# Altium footprint library Package_DFN_QFN.PcbLib: 735 footprints (part 7 of 46)
Each footprint in its own frame and in the unit in brackets; x right, y up, seen from the top. Pads: shape width x height; smd on the part's side, far side on the other; paste and mask are expansions set on the pad; w line width, h text height; cw(c..) or ccw(c..) is an arc to the next point about the centre after c.
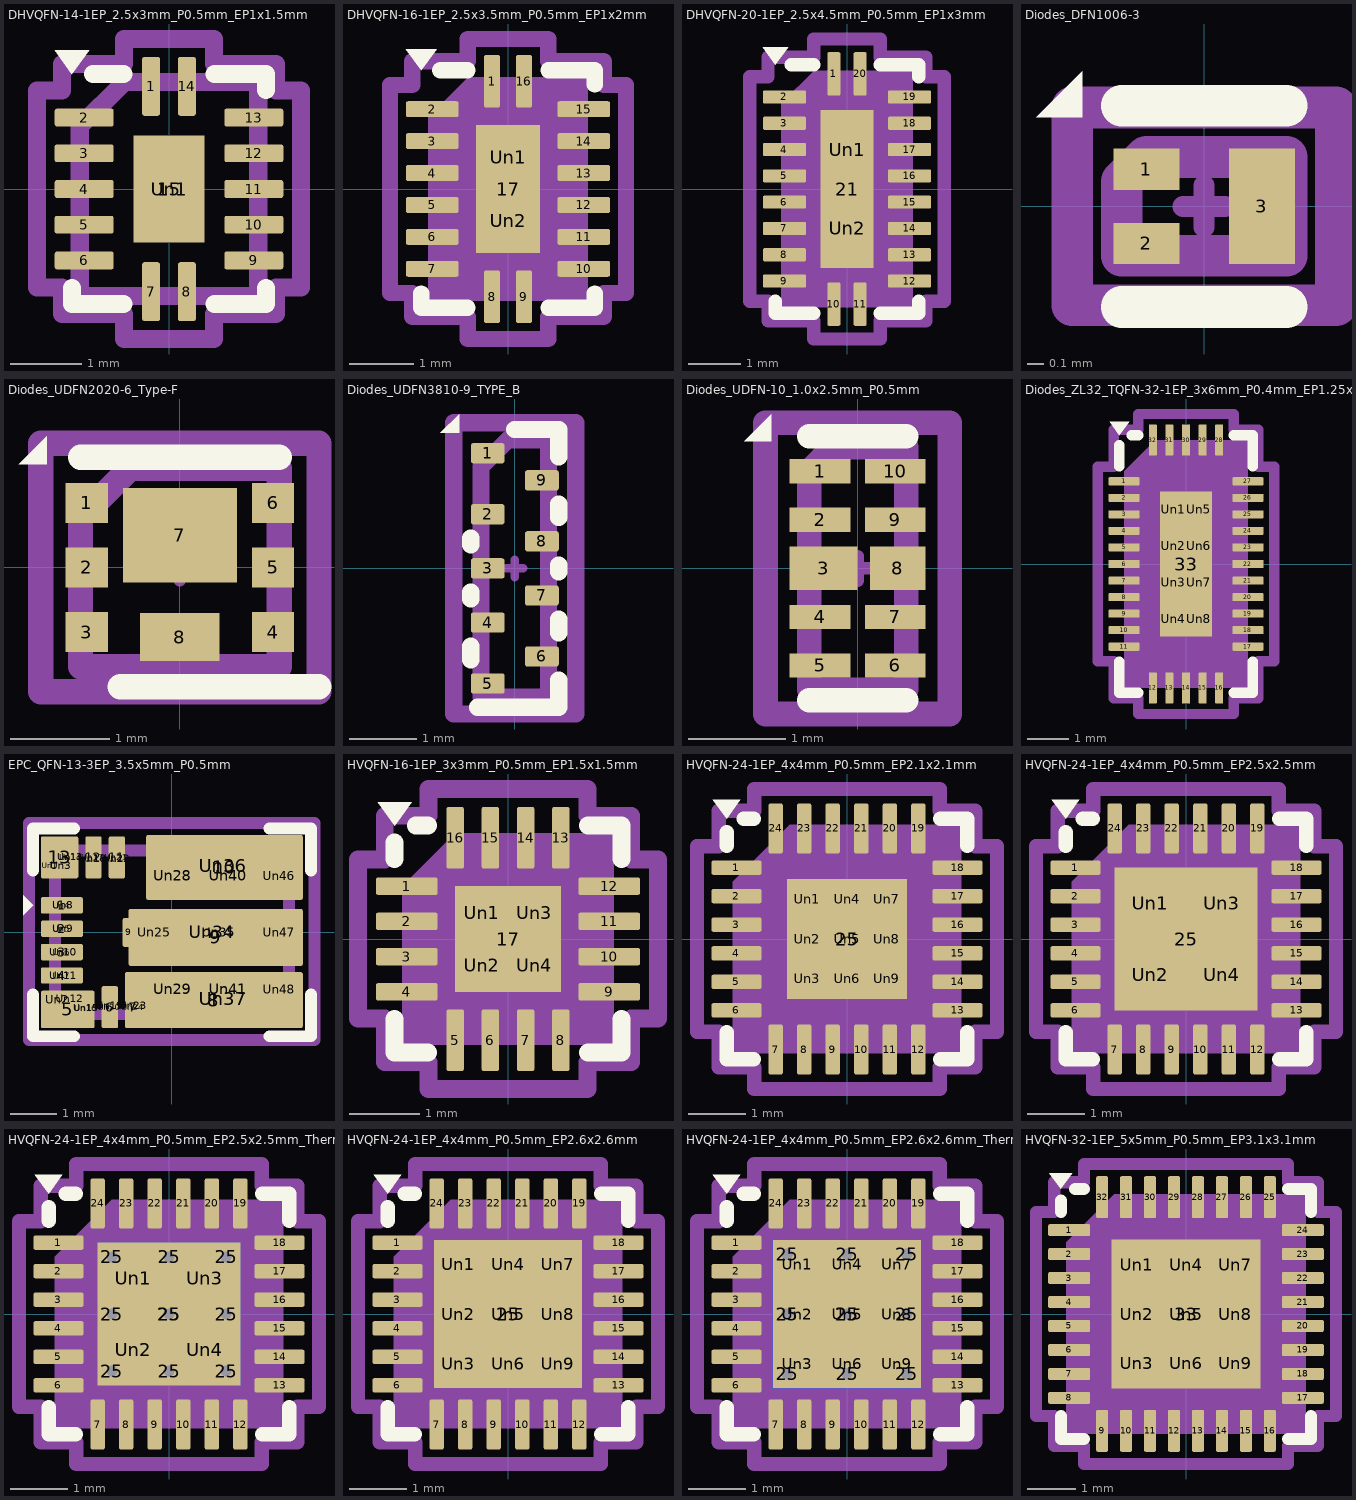
[diagram p6: the footprints below, top view; thin cyan lines are the x and y axes]

## DHVQFN-14-1EP_2.5x3mm_P0.5mm_EP1x1.5mm [mm] "DHVQFN-14-1EP_2.5x3mm_P0.5mm_EP1x1.5mm"
pads (16):
  rrect25% 0.25x0.825 smd: 1(-0.25,1.438) 7(-0.25,-1.438) 8(0.25,-1.438) 14(0.25,1.438)
  rrect25% 0.825x0.25 smd: 2(-1.188,1) 3(-1.188,0.5) 4(-1.188,0) 5(-1.188,-0.5) 6(-1.188,-1) 9(1.188,-1) 10(1.188,-0.5) 11(1.188,0) 12(1.188,0.5) 13(1.188,1)
  rect 1x1.5 smd: 15(0,0)
  rrect25% 0.81x1.21 on Top Paste: Un1(0,0)
F.SilkS:
  region: -1.36,1.61 -1.6,1.94 -1.12,1.94
  lines w0.254: -1.36,-1.385 -1.36,-1.61 -0.635,-1.61 ; -1.06,1.61 -0.635,1.61 ; 0.635,-1.61 1.36,-1.61 1.36,-1.385 ; 0.635,1.61 1.36,1.61 1.36,1.385
Top Component Center:
  lines w0.127: -0.127,0 0.127,0 -0.127,0 ; 0,-0.127 0,0.127 0,-0.127
Top Assembly:
  lines w0.254: -1.25,-1.5 1.25,-1.5 1.25,1.5 -0.625,1.5 -1.25,0.875 -1.25,-1.5
Top Courtyard:
  lines w0.254: -1.85,-1.38 -1.85,1.38 -1.5,1.38 -1.5,1.75 -0.63,1.75 -0.63,2.1 0.63,2.1 0.63,1.75 1.5,1.75 1.5,1.38 1.85,1.38 1.85,-1.38 1.5,-1.38 1.5,-1.75 0.63,-1.75 0.63,-2.1 -0.63,-2.1 -0.63,-1.75 -1.5,-1.75 -1.5,-1.38 -1.85,-1.38
Top Designator:
  text ".Designator" at -3.43,-0.344 h1.52
3D body "DHVQFN-14-1EP_2.5x3mm_P0.5mm_EP1x1.5mm.step": height 1, standoff 0, extent -1.25,-1.5 1.25,1.5

## DHVQFN-16-1EP_2.5x3.5mm_P0.5mm_EP1x2mm [mm] "DHVQFN-16-1EP_2.5x3.5mm_P0.5mm_EP1x2mm"
pads (19):
  rrect25% 0.25x0.825 smd: 1(-0.25,1.687) 8(-0.25,-1.687) 9(0.25,-1.687) 16(0.25,1.687)
  rrect25% 0.825x0.25 smd: 2(-1.188,1.25) 3(-1.188,0.75) 4(-1.188,0.25) 5(-1.188,-0.25) 6(-1.188,-0.75) 7(-1.188,-1.25) 10(1.188,-1.25) 11(1.188,-0.75) 12(1.188,-0.25) 13(1.188,0.25) 14(1.188,0.75) 15(1.188,1.25)
  rect 1x2 smd: 17(0,0)
  rrect25% 0.81x0.81 on Top Paste: Un1(0,0.5) Un2(0,-0.5)
F.SilkS:
  region: -1.36,1.86 -1.6,2.19 -1.12,2.19
  lines w0.254: -1.36,-1.635 -1.36,-1.86 -0.635,-1.86 ; -1.06,1.86 -0.635,1.86 ; 0.635,-1.86 1.36,-1.86 1.36,-1.635 ; 0.635,1.86 1.36,1.86 1.36,1.635
Top Component Center:
  lines w0.127: -0.127,0 0.127,0 -0.127,0 ; 0,-0.127 0,0.127 0,-0.127
Top Assembly:
  region: 1.25,-1.75 -1.25,-1.75 -1.25,1.125 -0.625,1.75 1.25,1.75
Top Courtyard:
  lines w0.254: -1.85,-1.63 -1.85,1.63 -1.5,1.63 -1.5,2 -0.63,2 -0.63,2.35 0.63,2.35 0.63,2 1.5,2 1.5,1.63 1.85,1.63 1.85,-1.63 1.5,-1.63 1.5,-2 0.63,-2 0.63,-2.35 -0.63,-2.35 -0.63,-2 -1.5,-2 -1.5,-1.63 -1.85,-1.63
Top Designator:
  text ".Designator" at -3.43,-0.344 h1.52

## DHVQFN-20-1EP_2.5x4.5mm_P0.5mm_EP1x3mm [mm] "DHVQFN-20-1EP_2.5x4.5mm_P0.5mm_EP1x3mm"
pads (23):
  rrect25% 0.25x0.825 smd: 1(-0.25,2.187) 10(-0.25,-2.187) 11(0.25,-2.187) 20(0.25,2.187)
  rrect25% 0.825x0.25 smd: 2(-1.188,1.75) 3(-1.188,1.25) 4(-1.188,0.75) 5(-1.188,0.25) 6(-1.188,-0.25) 7(-1.188,-0.75) 8(-1.188,-1.25) 9(-1.188,-1.75) 12(1.188,-1.75) 13(1.188,-1.25) 14(1.188,-0.75) 15(1.188,-0.25) 16(1.188,0.25) 17(1.188,0.75) 18(1.188,1.25) 19(1.188,1.75)
  rect 1x3 smd: 21(0,0)
  rrect25% 0.81x1.21 on Top Paste: Un1(0,0.75) Un2(0,-0.75)
F.SilkS:
  region: -1.36,2.36 -1.6,2.69 -1.12,2.69
  lines w0.254: -1.36,-2.135 -1.36,-2.36 -0.635,-2.36 ; -1.06,2.36 -0.635,2.36 ; 0.635,-2.36 1.36,-2.36 1.36,-2.135 ; 0.635,2.36 1.36,2.36 1.36,2.135
Top Component Center:
  lines w0.127: -0.127,0 0.127,0 -0.127,0 ; 0,-0.127 0,0.127 0,-0.127
Top Assembly:
  region: 1.25,-2.25 -1.25,-2.25 -1.25,1.625 -0.625,2.25 1.25,2.25
Top Courtyard:
  lines w0.254: -1.85,-2.13 -1.5,-2.13 -1.5,-2.5 -0.63,-2.5 -0.63,-2.85 0.63,-2.85 0.63,-2.5 1.5,-2.5 1.5,-2.13 1.85,-2.13 1.85,2.13 1.5,2.13 1.5,2.5 0.63,2.5 0.63,2.85 -0.63,2.85 -0.63,2.5 -1.5,2.5 -1.5,2.13 -1.85,2.13 -1.85,-2.13
Top Designator:
  text ".Designator" at -3.43,-0.344 h1.52

## Diodes_DFN1006-3 [mm] "Diodes_DFN1006-3"
pads (3):
  rect 0.4x0.25 smd: 1(-0.35,0.225) 2(-0.35,-0.225)
  rect 0.4x0.7 smd: 3(0.35,0)
F.SilkS:
  region: -0.74,0.54 -1.02,0.54 -0.74,0.82
  lines w0.254: -0.5,-0.61 0.5,-0.61 ; -0.5,0.61 0.5,0.61
Top Component Center:
  lines w0.127: -0.127,0 0.127,0 -0.127,0 ; 0,-0.127 0,0.127 0,-0.127
Top Assembly:
  lines w0.254: -0.5,-0.3 -0.5,0.15 -0.35,0.3 0.5,0.3 0.5,-0.3 -0.5,-0.3
Top Courtyard:
  lines w0.254: -0.8,-0.6 -0.8,0.6 0.8,0.6 0.8,-0.6 -0.8,-0.6
Top Designator:
  text ".Designator" at -1.69,-0.17 h0.75

## Diodes_UDFN2020-6_Type-F [mm] "Diodes_UDFN2020-6_Type-F"
pads (8):
  rect 0.425x0.4 smd: 1(-0.937,0.65) 2(-0.937,0) 3(-0.937,-0.65) 4(0.937,-0.65) 5(0.937,0) 6(0.937,0.65)
  rect 1.15x0.95 smd: 7(0,0.325)
  rect 0.8x0.48 smd: 8(0,-0.7)
F.SilkS:
  region: -1.34,1.04 -1.62,1.04 -1.34,1.32
  lines w0.254: -1,1.11 1,1.11 ; -0.6,-1.2 1.4,-1.2
Top Component Center:
  lines w0.127: -0.127,0 0.127,0 -0.127,0 ; 0,-0.127 0,0.127 0,-0.127
Top Assembly:
  lines w0.254: -1,-1 -1,0.5 -0.5,1 1,1 1,-1 -1,-1
Top Courtyard:
  lines w0.254: -1.4,-1.25 -1.4,1.25 1.4,1.25 1.4,-1.25 -1.4,-1.25
Top Designator:
  text ".Designator" at -2.251,-0.226 h1

## Diodes_UDFN3810-9_TYPE_B [mm] "Diodes_UDFN3810-9_TYPE_B"
pads (9):
  rrect25% 0.5x0.3 smd: 1(-0.4,1.7) 2(-0.4,0.8) 3(-0.4,0) 4(-0.4,-0.8) 5(-0.4,-1.7) 6(0.4,-1.3) 7(0.4,-0.4) 8(0.4,0.4) 9(0.4,1.3)
F.SilkS:
  region: -0.82,2 -1.1,2 -0.82,2.28
  lines w0.254: -0.65,-1.35 -0.65,-1.15 ; -0.65,-0.45 -0.65,-0.35 ; -0.65,0.35 -0.65,0.45 ; -0.55,-2.05 0.65,-2.05 0.65,-1.65 ; 0,2.05 0.65,2.05 0.65,1.65 ; 0.65,-0.95 0.65,-0.75 ; 0.65,-0.05 0.65,0.05 ; 0.65,0.75 0.65,0.95
Top Component Center:
  lines w0.127: -0.127,0 0.127,0 -0.127,0 ; 0,-0.127 0,0.127 0,-0.127
Top Assembly:
  lines w0.254: -0.5,-1.9 0.5,-1.9 0.5,1.9 -0.1,1.9 -0.5,1.5 -0.5,-1.9
Top Courtyard:
  lines w0.254: -0.9,-2.15 0.9,-2.15 0.9,2.15 -0.9,2.15 -0.9,-2.15
Top Designator:
  text ".Designator" at -2.251,-0.226 h1
3D body "Diodes_UDFN3810-9_TYPE_B.step": height 0.5, standoff -0.01, extent -0.51,-1.9 0.51,1.9

## Diodes_UDFN-10_1.0x2.5mm_P0.5mm [mm] "Diodes_UDFN-10_1.0x2.5mm_P0.5mm"
pads (10):
  rect 0.625x0.25 smd: 1(-0.387,1) 2(-0.387,0.5) 4(-0.387,-0.5) 5(-0.387,-1) 6(0.387,-1) 7(0.387,-0.5) 9(0.387,0.5) 10(0.387,1)
  rect 0.7x0.45 smd: 3(-0.35,0)
  rect 0.575x0.45 smd: 8(0.413,0)
F.SilkS:
  region: -0.89,1.31 -1.17,1.31 -0.89,1.59
  lines w0.254: -0.5,-1.36 0.5,-1.36 ; -0.5,1.36 0.5,1.36
Top Component Center:
  lines w0.127: -0.127,0 0.127,0 -0.127,0 ; 0,-0.127 0,0.127 0,-0.127
Top Assembly:
  lines w0.254: -0.5,-1.25 0.5,-1.25 0.5,1.25 -0.25,1.25 -0.5,1 -0.5,-1.25
Top Courtyard:
  lines w0.254: -0.95,-1.5 0.95,-1.5 0.95,1.5 -0.95,1.5 -0.95,-1.5
Top Designator:
  text ".Designator" at -1.121,-0.113 h0.5
3D body "Diodes_UDFN-10_1.0x2.5mm_P0.5mm.step": height 0.6, standoff 0, extent -0.506,-1.246 0.506,1.246

## Diodes_ZL32_TQFN-32-1EP_3x6mm_P0.4mm_EP1.25x3.5mm [mm] "Diodes_ZL32_TQFN-32-1EP_3x6mm_P0.4mm_EP1.25x3.5mm"
pads (41):
  rrect25% 0.75x0.2 smd: 1(-1.5,2) 2(-1.5,1.6) 3(-1.5,1.2) 4(-1.5,0.8) 5(-1.5,0.4) 6(-1.5,0) 7(-1.5,-0.4) 8(-1.5,-0.8) 9(-1.5,-1.2) 10(-1.5,-1.6) 11(-1.5,-2) 17(1.5,-2) 18(1.5,-1.6) 19(1.5,-1.2) 20(1.5,-0.8) 21(1.5,-0.4) 22(1.5,0) 23(1.5,0.4) 24(1.5,0.8) 25(1.5,1.2) 26(1.5,1.6) 27(1.5,2)
  rrect25% 0.2x0.75 smd: 12(-0.8,-3) 13(-0.4,-3) 14(0,-3) 15(0.4,-3) 16(0.8,-3) 28(0.8,3) 29(0.4,3) 30(0,3) 31(-0.4,3) 32(-0.8,3)
  rect 1.25x3.5 smd: 33(0,0)
  rrect25% 0.5x0.71 on Top Paste: Un1(-0.31,1.32) Un2(-0.31,0.44) Un3(-0.31,-0.44) Un4(-0.31,-1.32) Un5(0.31,1.32) Un6(0.31,0.44) Un7(0.31,-0.44) Un8(0.31,-1.32)
F.SilkS:
  region: -1.61,3.11 -1.85,3.44 -1.37,3.44
  lines w0.254: -1.61,-2.36 -1.61,-3.11 -1.16,-3.11 ; -1.61,2.36 -1.61,2.87 ; -1.31,3.11 -1.16,3.11 ; 1.16,-3.11 1.61,-3.11 1.61,-2.36 ; 1.16,3.11 1.61,3.11 1.61,2.36
Top Component Center:
  lines w0.127: -0.127,0 0.127,0 -0.127,0 ; 0,-0.127 0,0.127 0,-0.127
Top Assembly:
  region: 1.5,-3 -1.5,-3 -1.5,2.25 -0.75,3 1.5,3
Top Courtyard:
  lines w0.254: -2.13,-2.35 -1.75,-2.35 -1.75,-3.25 -1.15,-3.25 -1.15,-3.63 1.15,-3.63 1.15,-3.25 1.75,-3.25 1.75,-2.35 2.13,-2.35 2.13,2.35 1.75,2.35 1.75,3.25 1.15,3.25 1.15,3.63 -1.15,3.63 -1.15,3.25 -1.75,3.25 -1.75,2.35 -2.13,2.35 -2.13,-2.35
Top Designator:
  text ".Designator" at -3.43,-0.344 h1.52

## EPC_QFN-13-3EP_3.5x5mm_P0.5mm [mm] "EPC_QFN-13-3EP_3.5x5mm_P0.5mm"
pads (62):
  rrect23% 0.9x0.35 smd: 1(-2.351,0.578) 2(-2.351,0.078) 3(-2.351,-0.422) 4(-2.351,-0.922)
  rrect10% 1.15x0.8 smd: 5(-2.225,-1.647)
  rrect23% 0.35x0.9 smd: 6(-1.325,-1.598) 7(-0.825,-1.598) 11(-1.175,1.603) 12(-1.675,1.603)
  rrect7% 3.8x1.2 smd: 8(0.898,-1.447)
  rrect32% 0.25x0.623 smd: 9(-0.925,0)
  rrect7% 3.725x1.22 smd: 9(0.937,-0.107)
  rrect6% 3.35x1.39 smd: 10(1.125,1.39)
  rrect10% 0.8x0.9 smd: 13(-2.4,1.603)
  rrect16% 0.305x0.4 on Top Paste: Un1(-2.598,1.428)
  rrect15% 0.625x0.325 on Top Paste: Un2(-2.438,-1.435)
  rrect10% 0.675x0.3 on Top Solder: Un3(-2.362,1.428)
  rrect21% 0.8x0.24 on Top Paste: Un4(-2.351,0.575) Un5(-2.351,0.078) Un6(-2.351,-0.422) Un7(-2.351,-0.922)
  rrect10% 0.75x0.3 on Top Solder: Un8(-2.325,0.578) Un9(-2.325,0.078) Un10(-2.325,-0.422) Un11(-2.325,-0.922)
  rrect10% 1.025x0.3 on Top Solder: Un12(-2.187,-1.422)
  rrect10% 0.3x0.675 on Top Solder: Un13(-2.175,1.615) Un15(-1.825,-1.61)
  rrect21% 0.24x0.8 on Top Paste: Un14(-2.145,1.603) Un17(-1.675,1.603) Un20(-1.325,-1.598) Un21(-1.175,1.603) Un24(-0.825,-1.598)
  rrect21% 0.24x0.7 on Top Paste: Un16(-1.825,-1.622)
  rrect10% 0.3x0.75 on Top Solder: Un18(-1.675,1.578) Un19(-1.325,-1.572) Un22(-1.175,1.578) Un23(-0.825,-1.572)
  rrect14% 1x0.355 on Top Paste: Un25(-0.375,0) Un35(1.005,0)
  rrect16% 0.32x0.33 on Top Paste: Un26(-0.375,-1.81) Un27(-0.325,1.81) Un30(0.125,-1.81) Un31(0.175,1.81) Un32(0.625,-1.81) Un33(0.675,1.81) Un38(1.125,-1.81) Un39(1.175,1.81) Un42(1.625,-1.81) Un43(1.675,1.81) Un44(2.125,-1.81) Un45(2.175,1.81)
  rrect10% 1x0.495 on Top Paste: Un28(0.021,1.215) Un29(0.021,-1.215) Un40(1.201,1.215) Un41(1.201,-1.215)
  rrect22% 3.675x0.48 on Top Solder: Un34(0.863,0)
  rrect10% 3.2x1.05 on Top Solder: Un36(1.1,1.428) Un37(1.1,-1.422)
  rrect10% 0.819x0.495 on Top Paste: Un46(2.29,1.215) Un48(2.29,-1.215)
  rrect14% 0.815x0.355 on Top Paste: Un47(2.29,0)
F.SilkS:
  region: -2.96,0.578 -3.172,0.366 -3.172,0.79
  lines w0.254: -2.97,-1.325 -2.97,-2.22 -2.085,-2.22 ; -2.97,1.325 -2.97,2.22 -2.085,2.22 ; 2.087,-2.22 2.973,-2.22 ; 2.087,2.22 2.973,2.22 ; 2.97,-2.22 2.97,-1.325 ; 2.97,1.325 2.97,2.22
Top Component Center:
  lines w0.127: -0.127,0 0.127,0 -0.127,0 ; 0,-0.127 0,0.127 0,-0.127
Top Assembly:
  lines w0.254: -2.5,-1.75 -2.5,1.75 2.5,1.75 2.5,-1.75 -2.5,-1.75
Top Courtyard:
  lines w0.254: -3.05,-2.3 -3.05,2.34 3.05,2.34 3.05,-2.3 -3.05,-2.3
Top Designator:
  text ".Designator" at -3.43,-0.344 h1.52

## HVQFN-16-1EP_3x3mm_P0.5mm_EP1.5x1.5mm [mm] "HVQFN-16-1EP_3x3mm_P0.5mm_EP1.5x1.5mm"
pads (21):
  rrect25% 0.875x0.25 smd: 1(-1.438,0.75) 2(-1.438,0.25) 3(-1.438,-0.25) 4(-1.438,-0.75) 9(1.438,-0.75) 10(1.438,-0.25) 11(1.438,0.25) 12(1.438,0.75)
  rrect25% 0.25x0.875 smd: 5(-0.75,-1.438) 6(-0.25,-1.438) 7(0.25,-1.438) 8(0.75,-1.438) 13(0.75,1.438) 14(0.25,1.438) 15(-0.25,1.438) 16(-0.75,1.438)
  rect 1.5x1.5 smd: 17(0,0)
  rrect25% 0.6x0.6 on Top Paste: Un1(-0.375,0.375) Un2(-0.375,-0.375) Un3(0.375,0.375) Un4(0.375,-0.375)
F.SilkS:
  region: -1.61,1.61 -1.85,1.94 -1.37,1.94
  lines w0.254: -1.61,-1.135 -1.61,-1.61 -1.135,-1.61 ; -1.61,1.135 -1.61,1.37 ; -1.31,1.61 -1.135,1.61 ; 1.135,-1.61 1.61,-1.61 1.61,-1.135 ; 1.135,1.61 1.61,1.61 1.61,1.135
Top Component Center:
  lines w0.127: -0.127,0 0.127,0 -0.127,0 ; 0,-0.127 0,0.127 0,-0.127
Top Assembly:
  region: 1.5,-1.5 -1.5,-1.5 -1.5,0.75 -0.75,1.5 1.5,1.5
Top Courtyard:
  lines w0.254: -2.13,-1.13 -2.13,1.13 -1.75,1.13 -1.75,1.75 -1.13,1.75 -1.13,2.13 1.13,2.13 1.13,1.75 1.75,1.75 1.75,1.13 2.13,1.13 2.13,-1.13 1.75,-1.13 1.75,-1.75 1.13,-1.75 1.13,-2.13 -1.13,-2.13 -1.13,-1.75 -1.75,-1.75 -1.75,-1.13 -2.13,-1.13
Top Designator:
  text ".Designator" at -3.43,-0.344 h1.52

## HVQFN-24-1EP_4x4mm_P0.5mm_EP2.1x2.1mm [mm] "HVQFN-24-1EP_4x4mm_P0.5mm_EP2.1x2.1mm"
pads (34):
  rrect25% 0.875x0.25 smd: 1(-1.937,1.25) 2(-1.937,0.75) 3(-1.937,0.25) 4(-1.937,-0.25) 5(-1.937,-0.75) 6(-1.937,-1.25) 13(1.937,-1.25) 14(1.937,-0.75) 15(1.937,-0.25) 16(1.937,0.25) 17(1.937,0.75) 18(1.937,1.25)
  rrect25% 0.25x0.875 smd: 7(-1.25,-1.937) 8(-0.75,-1.937) 9(-0.25,-1.937) 10(0.25,-1.937) 11(0.75,-1.937) 12(1.25,-1.937) 19(1.25,1.937) 20(0.75,1.937) 21(0.25,1.937) 22(-0.25,1.937) 23(-0.75,1.937) 24(-1.25,1.937)
  rect 2.1x2.1 smd: 25(0,0)
  rrect25% 0.56x0.56 on Top Paste: Un1(-0.7,0.7) Un2(-0.7,0) Un3(-0.7,-0.7) Un4(0,0.7) Un5(0,0) Un6(0,-0.7) Un7(0.7,0.7) Un8(0.7,0) Un9(0.7,-0.7)
F.SilkS:
  region: -2.11,2.11 -2.35,2.44 -1.87,2.44
  lines w0.254: -2.11,-1.635 -2.11,-2.11 -1.635,-2.11 ; -2.11,1.635 -2.11,1.87 ; -1.81,2.11 -1.635,2.11 ; 1.635,-2.11 2.11,-2.11 2.11,-1.635 ; 1.635,2.11 2.11,2.11 2.11,1.635
Top Component Center:
  lines w0.127: -0.127,0 0.127,0 -0.127,0 ; 0,-0.127 0,0.127 0,-0.127
Top Assembly:
  region: 2,-2 -2,-2 -2,1 -1,2 2,2
Top Courtyard:
  lines w0.254: -2.63,-1.63 -2.25,-1.63 -2.25,-2.25 -1.63,-2.25 -1.63,-2.63 1.63,-2.63 1.63,-2.25 2.25,-2.25 2.25,-1.63 2.63,-1.63 2.63,1.63 2.25,1.63 2.25,2.25 1.63,2.25 1.63,2.63 -1.63,2.63 -1.63,2.25 -2.25,2.25 -2.25,1.63 -2.63,1.63 -2.63,-1.63
Top Designator:
  text ".Designator" at -3.43,-0.344 h1.52
3D body "HVQFN-24-1EP_4x4mm_P0.5mm_EP2.1x2.1mm.step": height 1.02, standoff 0, extent -2,-2 2,2

## HVQFN-24-1EP_4x4mm_P0.5mm_EP2.5x2.5mm [mm] "HVQFN-24-1EP_4x4mm_P0.5mm_EP2.5x2.5mm"
pads (29):
  rrect25% 0.875x0.25 smd: 1(-1.937,1.25) 2(-1.937,0.75) 3(-1.937,0.25) 4(-1.937,-0.25) 5(-1.937,-0.75) 6(-1.937,-1.25) 13(1.937,-1.25) 14(1.937,-0.75) 15(1.937,-0.25) 16(1.937,0.25) 17(1.937,0.75) 18(1.937,1.25)
  rrect25% 0.25x0.875 smd: 7(-1.25,-1.937) 8(-0.75,-1.937) 9(-0.25,-1.937) 10(0.25,-1.937) 11(0.75,-1.937) 12(1.25,-1.937) 19(1.25,1.937) 20(0.75,1.937) 21(0.25,1.937) 22(-0.25,1.937) 23(-0.75,1.937) 24(-1.25,1.937)
  rect 2.5x2.5 smd: 25(0,0)
  rrect25% 1.01x1.01 on Top Paste: Un1(-0.625,0.625) Un2(-0.625,-0.625) Un3(0.625,0.625) Un4(0.625,-0.625)
F.SilkS:
  region: -2.11,2.11 -2.35,2.44 -1.87,2.44
  lines w0.254: -2.11,-1.635 -2.11,-2.11 -1.635,-2.11 ; -2.11,1.635 -2.11,1.87 ; -1.81,2.11 -1.635,2.11 ; 1.635,-2.11 2.11,-2.11 2.11,-1.635 ; 1.635,2.11 2.11,2.11 2.11,1.635
Top Component Center:
  lines w0.127: -0.127,0 0.127,0 -0.127,0 ; 0,-0.127 0,0.127 0,-0.127
Top Assembly:
  region: 2,-2 -2,-2 -2,1 -1,2 2,2
Top Courtyard:
  lines w0.254: -2.63,-1.63 -2.63,1.63 -2.25,1.63 -2.25,2.25 -1.63,2.25 -1.63,2.63 1.63,2.63 1.63,2.25 2.25,2.25 2.25,1.63 2.63,1.63 2.63,-1.63 2.25,-1.63 2.25,-2.25 1.63,-2.25 1.63,-2.63 -1.63,-2.63 -1.63,-2.25 -2.25,-2.25 -2.25,-1.63 -2.63,-1.63
Top Designator:
  text ".Designator" at -3.43,-0.344 h1.52
3D body "HVQFN-24-1EP_4x4mm_P0.5mm_EP2.1x2.1mm.step": height 1.02, standoff 0, extent -2,-2 2,2

## HVQFN-24-1EP_4x4mm_P0.5mm_EP2.5x2.5mm_ThermalVias [mm] "HVQFN-24-1EP_4x4mm_P0.5mm_EP2.5x2.5mm_ThermalVias"
pads (39):
  rrect25% 0.875x0.25 smd: 1(-1.937,1.25) 2(-1.937,0.75) 3(-1.937,0.25) 4(-1.937,-0.25) 5(-1.937,-0.75) 6(-1.937,-1.25) 13(1.937,-1.25) 14(1.937,-0.75) 15(1.937,-0.25) 16(1.937,0.25) 17(1.937,0.75) 18(1.937,1.25)
  rrect25% 0.25x0.875 smd: 7(-1.25,-1.937) 8(-0.75,-1.937) 9(-0.25,-1.937) 10(0.25,-1.937) 11(0.75,-1.937) 12(1.25,-1.937) 19(1.25,1.937) 20(0.75,1.937) 21(0.25,1.937) 22(-0.25,1.937) 23(-0.75,1.937) 24(-1.25,1.937)
  round 0.5 hole 0.2: 25(-1,-1) 25(-1,0) 25(-1,1) 25(0,-1) 25(0,0) 25(0,1) 25(1,-1) 25(1,0) 25(1,1)
  rect 2.5x2.5 smd: 25(0,0)
  rect 2.5x2.5 smd far side: 25(0,0)
  rrect25% 0.93x0.93 on Top Paste: Un1(-0.625,0.625) Un2(-0.625,-0.625) Un3(0.625,0.625) Un4(0.625,-0.625)
F.SilkS:
  region: -2.11,2.11 -2.35,2.44 -1.87,2.44
  lines w0.254: -2.11,-1.635 -2.11,-2.11 -1.635,-2.11 ; -2.11,1.635 -2.11,1.87 ; -1.81,2.11 -1.635,2.11 ; 1.635,-2.11 2.11,-2.11 2.11,-1.635 ; 1.635,2.11 2.11,2.11 2.11,1.635
Top Component Center:
  lines w0.127: -0.127,0 0.127,0 -0.127,0 ; 0,-0.127 0,0.127 0,-0.127
Top Assembly:
  region: 2,-2 -2,-2 -2,1 -1,2 2,2
Top Courtyard:
  lines w0.254: -2.63,-1.63 -2.63,1.63 -2.25,1.63 -2.25,2.25 -1.63,2.25 -1.63,2.63 1.63,2.63 1.63,2.25 2.25,2.25 2.25,1.63 2.63,1.63 2.63,-1.63 2.25,-1.63 2.25,-2.25 1.63,-2.25 1.63,-2.63 -1.63,-2.63 -1.63,-2.25 -2.25,-2.25 -2.25,-1.63 -2.63,-1.63
Top Designator:
  text ".Designator" at -3.43,-0.344 h1.52
3D body "HVQFN-24-1EP_4x4mm_P0.5mm_EP2.1x2.1mm.step": height 1.02, standoff 0, extent -2,-2 2,2

## HVQFN-24-1EP_4x4mm_P0.5mm_EP2.6x2.6mm [mm] "HVQFN-24-1EP_4x4mm_P0.5mm_EP2.6x2.6mm"
pads (34):
  rrect25% 0.875x0.25 smd: 1(-1.937,1.25) 2(-1.937,0.75) 3(-1.937,0.25) 4(-1.937,-0.25) 5(-1.937,-0.75) 6(-1.937,-1.25) 13(1.937,-1.25) 14(1.937,-0.75) 15(1.937,-0.25) 16(1.937,0.25) 17(1.937,0.75) 18(1.937,1.25)
  rrect25% 0.25x0.875 smd: 7(-1.25,-1.937) 8(-0.75,-1.937) 9(-0.25,-1.937) 10(0.25,-1.937) 11(0.75,-1.937) 12(1.25,-1.937) 19(1.25,1.937) 20(0.75,1.937) 21(0.25,1.937) 22(-0.25,1.937) 23(-0.75,1.937) 24(-1.25,1.937)
  rect 2.6x2.6 smd: 25(0,0)
  rrect25% 0.7x0.7 on Top Paste: Un1(-0.87,0.87) Un2(-0.87,0) Un3(-0.87,-0.87) Un4(0,0.87) Un5(0,0) Un6(0,-0.87) Un7(0.87,0.87) Un8(0.87,0) Un9(0.87,-0.87)
F.SilkS:
  region: -2.11,2.11 -2.35,2.44 -1.87,2.44
  lines w0.254: -2.11,-1.635 -2.11,-2.11 -1.635,-2.11 ; -2.11,1.635 -2.11,1.87 ; -1.81,2.11 -1.635,2.11 ; 1.635,-2.11 2.11,-2.11 2.11,-1.635 ; 1.635,2.11 2.11,2.11 2.11,1.635
Top Component Center:
  lines w0.127: -0.127,0 0.127,0 -0.127,0 ; 0,-0.127 0,0.127 0,-0.127
Top Assembly:
  region: 2,-2 -2,-2 -2,1 -1,2 2,2
Top Courtyard:
  lines w0.254: -2.63,-1.63 -2.63,1.63 -2.25,1.63 -2.25,2.25 -1.63,2.25 -1.63,2.63 1.63,2.63 1.63,2.25 2.25,2.25 2.25,1.63 2.63,1.63 2.63,-1.63 2.25,-1.63 2.25,-2.25 1.63,-2.25 1.63,-2.63 -1.63,-2.63 -1.63,-2.25 -2.25,-2.25 -2.25,-1.63 -2.63,-1.63
Top Designator:
  text ".Designator" at -3.43,-0.344 h1.52
3D body "HVQFN-24-1EP_4x4mm_P0.5mm_EP2.1x2.1mm.step": height 1.02, standoff 0, extent -2,-2 2,2

## HVQFN-24-1EP_4x4mm_P0.5mm_EP2.6x2.6mm_ThermalVias [mm] "HVQFN-24-1EP_4x4mm_P0.5mm_EP2.6x2.6mm_ThermalVias"
pads (44):
  rrect25% 0.875x0.25 smd: 1(-1.937,1.25) 2(-1.937,0.75) 3(-1.937,0.25) 4(-1.937,-0.25) 5(-1.937,-0.75) 6(-1.937,-1.25) 13(1.937,-1.25) 14(1.937,-0.75) 15(1.937,-0.25) 16(1.937,0.25) 17(1.937,0.75) 18(1.937,1.25)
  rrect25% 0.25x0.875 smd: 7(-1.25,-1.937) 8(-0.75,-1.937) 9(-0.25,-1.937) 10(0.25,-1.937) 11(0.75,-1.937) 12(1.25,-1.937) 19(1.25,1.937) 20(0.75,1.937) 21(0.25,1.937) 22(-0.25,1.937) 23(-0.75,1.937) 24(-1.25,1.937)
  round 0.5 hole 0.2: 25(-1.05,-1.05) 25(-1.05,0) 25(-1.05,1.05) 25(0,-1.05) 25(0,0) 25(0,1.05) 25(1.05,-1.05) 25(1.05,0) 25(1.05,1.05)
  rect 2.6x2.6 smd: 25(0,0)
  rect 2.6x2.6 smd far side: 25(0,0)
  rrect25% 0.64x0.64 on Top Paste: Un1(-0.87,0.87) Un2(-0.87,0) Un3(-0.87,-0.87) Un4(0,0.87) Un5(0,0) Un6(0,-0.87) Un7(0.87,0.87) Un8(0.87,0) Un9(0.87,-0.87)
F.SilkS:
  region: -2.11,2.11 -2.35,2.44 -1.87,2.44
  lines w0.254: -2.11,-1.635 -2.11,-2.11 -1.635,-2.11 ; -2.11,1.635 -2.11,1.87 ; -1.81,2.11 -1.635,2.11 ; 1.635,-2.11 2.11,-2.11 2.11,-1.635 ; 1.635,2.11 2.11,2.11 2.11,1.635
Top Component Center:
  lines w0.127: -0.127,0 0.127,0 -0.127,0 ; 0,-0.127 0,0.127 0,-0.127
Top Assembly:
  region: 2,-2 -2,-2 -2,1 -1,2 2,2
Top Courtyard:
  lines w0.254: -2.63,-1.63 -2.25,-1.63 -2.25,-2.25 -1.63,-2.25 -1.63,-2.63 1.63,-2.63 1.63,-2.25 2.25,-2.25 2.25,-1.63 2.63,-1.63 2.63,1.63 2.25,1.63 2.25,2.25 1.63,2.25 1.63,2.63 -1.63,2.63 -1.63,2.25 -2.25,2.25 -2.25,1.63 -2.63,1.63 -2.63,-1.63
Top Designator:
  text ".Designator" at -3.43,-0.344 h1.52
3D body "HVQFN-24-1EP_4x4mm_P0.5mm_EP2.1x2.1mm.step": height 1.02, standoff 0, extent -2,-2 2,2

## HVQFN-32-1EP_5x5mm_P0.5mm_EP3.1x3.1mm [mm] "HVQFN-32-1EP_5x5mm_P0.5mm_EP3.1x3.1mm"
pads (42):
  rrect25% 0.875x0.25 smd: 1(-2.438,1.75) 2(-2.438,1.25) 3(-2.438,0.75) 4(-2.438,0.25) 5(-2.438,-0.25) 6(-2.438,-0.75) 7(-2.438,-1.25) 8(-2.438,-1.75) 17(2.438,-1.75) 18(2.438,-1.25) 19(2.438,-0.75) 20(2.438,-0.25) 21(2.438,0.25) 22(2.438,0.75) 23(2.438,1.25) 24(2.438,1.75)
  rrect25% 0.25x0.875 smd: 9(-1.75,-2.438) 10(-1.25,-2.438) 11(-0.75,-2.438) 12(-0.25,-2.438) 13(0.25,-2.438) 14(0.75,-2.438) 15(1.25,-2.438) 16(1.75,-2.438) 25(1.75,2.438) 26(1.25,2.438) 27(0.75,2.438) 28(0.25,2.438) 29(-0.25,2.438) 30(-0.75,2.438) 31(-1.25,2.438) 32(-1.75,2.438)
  rect 3.1x3.1 smd: 33(0,0)
  rrect25% 0.83x0.83 on Top Paste: Un1(-1.03,1.03) Un2(-1.03,0) Un3(-1.03,-1.03) Un4(0,1.03) Un5(0,0) Un6(0,-1.03) Un7(1.03,1.03) Un8(1.03,0) Un9(1.03,-1.03)
F.SilkS:
  region: -2.61,2.61 -2.85,2.94 -2.37,2.94
  lines w0.254: -2.61,-2.135 -2.61,-2.61 -2.135,-2.61 ; -2.61,2.135 -2.61,2.37 ; -2.31,2.61 -2.135,2.61 ; 2.135,-2.61 2.61,-2.61 2.61,-2.135 ; 2.135,2.61 2.61,2.61 2.61,2.135
Top Component Center:
  lines w0.127: -0.127,0 0.127,0 -0.127,0 ; 0,-0.127 0,0.127 0,-0.127
Top Assembly:
  region: 2.5,-2.5 -2.5,-2.5 -2.5,1.5 -1.5,2.5 2.5,2.5
Top Courtyard:
  lines w0.254: -3.13,-2.13 -3.13,2.13 -2.75,2.13 -2.75,2.75 -2.13,2.75 -2.13,3.13 2.13,3.13 2.13,2.75 2.75,2.75 2.75,2.13 3.13,2.13 3.13,-2.13 2.75,-2.13 2.75,-2.75 2.13,-2.75 2.13,-3.13 -2.13,-3.13 -2.13,-2.75 -2.75,-2.75 -2.75,-2.13 -3.13,-2.13
Top Designator:
  text ".Designator" at -3.43,-0.344 h1.52